# Altium footprint library Header2.PcbLib: 108 footprints (part 4 of 7)
Each footprint in its own frame and in the unit in brackets; x right, y up, seen from the top. Pads: shape width x height; smd on the part's side, far side on the other; paste and mask are expansions set on the pad; w line width, h text height; cw(c..) or ccw(c..) is an arc to the next point about the centre after c.
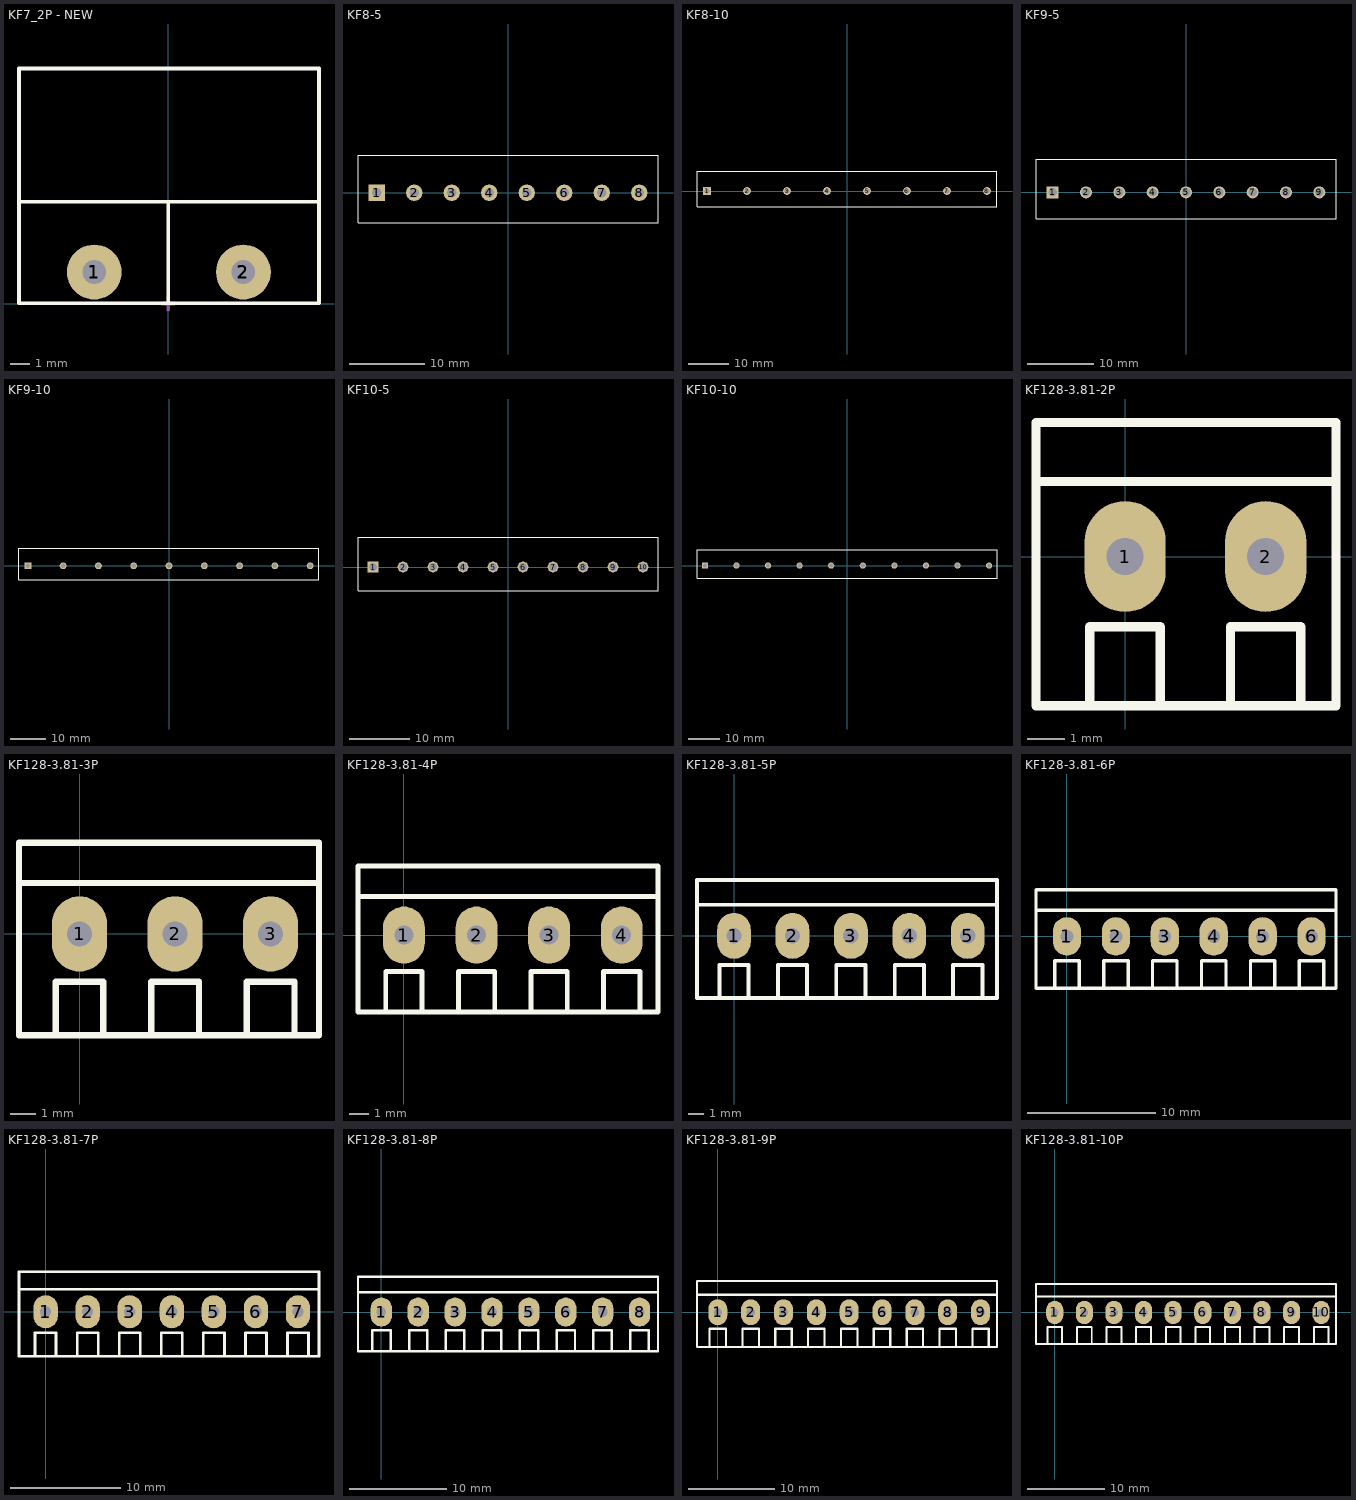
[diagram p3: the footprints below, top view; thin cyan lines are the x and y axes]

## KF7_2P - NEW [mm]
pads (8):
  round 2.794 hole 1.2: 1(-3.78,1.6) 1(-3.78,1.6) 1(-3.78,1.615) 1(-3.78,1.615) 2(3.84,1.6) 2(3.84,1.6) 2(3.84,1.615) 2(3.84,1.615)
Top Overlay:
  lines w0.2: -7.62,5.2 7.62,5.2 ; 0,0.015 0,5.19 ; -7.62,0.015 7.7,0.015 7.7,12 -7.62,12 -7.62,0.015
Mechanical 13:
  text "'.Designator'" at -1.7,0.6 h0.7
Mechanical 15:
  lines w0.2: -0.3,0 0.285,0 ; 0,-0.3 0,0.3
3D body "KF7_62-2P.STEP": height 12.41, standoff -6.29, extent -7.57,0 7.67,12

## KF8-5 [mm] "Serie 1337 - 5.00 mm_8 pins"
height 13
pads (8):
  rect 2.2x2.2 hole 1.3: 1(-17.5,0)
  round 2.2 hole 1.3: 2(-12.5,0) 3(-7.5,0) 4(-2.5,0) 5(2.5,0) 6(7.5,0) 7(12.5,0) 8(17.5,0)
Top Overlay:
  lines w0.127: -20,-4 20,-4 20,5 -20,5 -20,-4
3D body "691133710008.stp": height 13, standoff -3.6, extent -20,-4 20,5

## KF8-10 [mm] "Serie 1368 - 10.00 mm _ 8 pins"
height 13
pads (8):
  rect 1.95x1.95 hole 1.3: 1(-35,0)
  round 1.95 hole 1.3: 2(-25,0) 3(-15,0) 4(-5,0) 5(5,0) 6(15,0) 7(25,0) 8(35,0)
Top Overlay:
  lines w0.2: -37.5,-4 37.5,-4 37.5,5 -37.5,5 -37.5,-4
3D body "691136810008.stp": height 13.1, standoff -3.9, extent -37.5,-4 37.5,5

## KF9-5 [mm] "Serie 1337 - 5.00 mm_9 pins"
height 13
pads (9):
  rect 1.8x1.8 hole 1.3: 1(-20,0)
  round 1.8 hole 1.3: 2(-15,0) 3(-10,0) 4(-5,0) 5(0,0) 6(5,0) 7(10,0) 8(15,0) 9(20,0)
Top Overlay:
  lines w0.127: -22.5,-4 22.5,-4 22.5,5 -22.5,5 -22.5,-4
3D body "691133710009.stp": height 13, standoff -3.6, extent -22.5,-4 22.5,5

## KF9-10 [mm] "Serie 1368 - 10.00 mm _ 9 pins"
height 13
pads (9):
  rect 1.95x1.95 hole 1.3: 1(-40,0)
  round 1.95 hole 1.3: 2(-30,0) 3(-20,0) 4(-10,0) 5(0,0) 6(10,0) 7(20,0) 8(30,0) 9(40,0)
Top Overlay:
  lines w0.2: -42.5,-4 42.5,-4 42.5,5 -42.5,5 -42.5,-4
3D body "691136810009.stp": height 13.1, standoff -3.9, extent -42.5,-4 42.5,5

## KF10-5 [mm] "Serie 1337 - 5.00 mm_10 pins"
height 13
pads (10):
  rect 1.8x1.8 hole 1.3: 1(-22.5,0)
  round 1.8 hole 1.3: 2(-17.5,0) 3(-12.5,0) 4(-7.5,0) 5(-2.5,0) 6(2.5,0) 7(7.5,0) 8(12.5,0) 9(17.5,0) 10(22.5,0)
Top Overlay:
  lines w0.127: -25,-4 -25,5 25,5 25,-4 -25,-4
3D body "691133710010.stp": height 13, standoff -3.6, extent -25,-4 25,5

## KF10-10 [mm] "Serie 1368 - 10.00 mm _ 10 pins"
height 13
pads (10):
  rect 1.95x1.95 hole 1.3: 1(-45,0)
  round 1.95 hole 1.3: 2(-35,0) 3(-25,0) 4(-15,0) 5(-5,0) 6(5,0) 7(15,0) 8(25,0) 9(35,0) 10(45,0)
Top Overlay:
  lines w0.2: -47.5,-4 47.5,-4 47.5,5 -47.5,5 -47.5,-4
3D body "691136810010.stp": height 13.1, standoff -3.9, extent -47.5,-4 47.5,5

## KF128-3.81-2P [mm] "ÂÝ¶¤Ê½½ÓÏß¶Ë×Ó£¬½Å¾à3.81mm"
pads (2):
  oval 2.2x3 hole 1: 1(0,0) 2(3.81,0)
Top Overlay:
  lines w0.254: -2.413,2.032 5.715,2.032 ; -0.953,-4.039 -0.953,-1.905 0.953,-1.905 0.953,-4.039 ; 2.857,-4.039 2.857,-1.905 4.763,-1.905 4.763,-4.039 ; -2.413,-4.039 5.715,-4.039 5.715,3.632 -2.413,3.632 -2.413,-4.039
3D body "KF128-3.81.STEP": height 8.55, standoff -3.95, extent -2.413,-3.827 1.897,3.573
3D body "KF128-3.81.STEP": height 8.55, standoff -3.95, extent 1.397,-3.827 5.707,3.573

## KF128-3.81-3P [mm] "ÂÝ¶¤Ê½½ÓÏß¶Ë×Ó£¬½Å¾à3.81mm"
pads (3):
  oval 2.2x3 hole 1: 1(0,0) 2(3.81,0) 3(7.62,0)
Top Overlay:
  lines w0.254: -2.413,2.032 9.55,2.032 ; -0.953,-4.039 -0.953,-1.905 0.953,-1.905 0.953,-4.039 ; 2.857,-4.039 2.857,-1.905 4.763,-1.905 4.763,-4.039 ; 6.667,-4.039 6.667,-1.905 8.572,-1.905 8.572,-4.039 ; -2.413,-4.039 -2.413,3.632 9.55,3.632 9.55,-4.039 -2.413,-4.039
3D body "KF128-3.81.STEP": height 8.55, standoff -3.95, extent -2.413,-3.827 1.897,3.573
3D body "KF128-3.81.STEP": height 8.55, standoff -3.95, extent 1.397,-3.827 5.707,3.573
3D body "KF128-3.81.STEP": height 8.55, standoff -3.95, extent 5.207,-3.827 9.517,3.573

## KF128-3.81-4P [mm] "ÂÝ¶¤Ê½½ÓÏß¶Ë×Ó£¬½Å¾à3.81mm"
pads (4):
  oval 2.2x3 hole 1: 1(0,0) 2(3.81,0) 3(7.62,0) 4(11.43,0)
Top Overlay:
  lines w0.254: -2.413,2.032 13.335,2.032 ; -0.953,-4.039 -0.953,-1.905 0.953,-1.905 0.953,-4.039 ; 2.857,-4.039 2.857,-1.905 4.763,-1.905 4.763,-4.039 ; 6.667,-4.039 6.667,-1.905 8.572,-1.905 8.572,-4.039 ; 10.477,-4.039 10.477,-1.905 12.383,-1.905 12.383,-4.039 ; -2.413,-4.039 -2.413,3.632 13.335,3.632 13.335,-4.039 -2.413,-4.039
3D body "KF128-3.81.STEP": height 8.55, standoff -3.95, extent 9.017,-3.827 13.327,3.573
3D body "KF128-3.81.STEP": height 8.55, standoff -3.95, extent 5.207,-3.827 9.517,3.573
3D body "KF128-3.81.STEP": height 8.55, standoff -3.95, extent 1.397,-3.827 5.707,3.573
3D body "KF128-3.81.STEP": height 8.55, standoff -3.95, extent -2.413,-3.827 1.897,3.573

## KF128-3.81-5P [mm] "ÂÝ¶¤Ê½½ÓÏß¶Ë×Ó£¬½Å¾à3.81mm"
pads (5):
  oval 2.2x3 hole 1: 1(0,0) 2(3.81,0) 3(7.62,0) 4(11.43,0) 5(15.24,0)
Top Overlay:
  lines w0.254: -2.413,2.032 17.145,2.032 ; -0.953,-4.039 -0.953,-1.905 0.953,-1.905 0.953,-4.039 ; 2.857,-4.039 2.857,-1.905 4.763,-1.905 4.763,-4.039 ; 6.667,-4.039 6.667,-1.905 8.572,-1.905 8.572,-4.039 ; 10.477,-4.039 10.477,-1.905 12.383,-1.905 12.383,-4.039 ; 14.287,-4.039 14.287,-1.905 16.192,-1.905 16.192,-4.039 ; -2.413,-4.039 17.145,-4.039 17.145,3.632 -2.413,3.632 -2.413,-4.039
Mechanical 15:
  circle w0.05: c7.62,0 r0.35
  lines w0.05: 7.12,0 8.12,0 ; 7.62,-0.5 7.62,0.5
3D body "KF128-3.81.STEP": height 8.55, standoff -3.95, extent -2.413,-3.827 1.897,3.573
3D body "KF128-3.81.STEP": height 8.55, standoff -3.95, extent 1.397,-3.827 5.707,3.573
3D body "KF128-3.81.STEP": height 8.55, standoff -3.95, extent 5.207,-3.827 9.517,3.573
3D body "KF128-3.81.STEP": height 8.55, standoff -3.95, extent 12.827,-3.827 17.137,3.573
3D body "KF128-3.81.STEP": height 8.55, standoff -3.95, extent 9.017,-3.827 13.327,3.573

## KF128-3.81-6P [mm] "ÂÝ¶¤Ê½½ÓÏß¶Ë×Ó£¬½Å¾à3.81mm"
pads (6):
  oval 2.2x3 hole 1: 1(0,0) 2(3.81,0) 3(7.62,0) 4(11.43,0) 5(15.24,0) 6(19.05,0)
Top Overlay:
  lines w0.254: -2.413,2.032 20.955,2.032 ; -0.953,-4.039 -0.953,-1.905 0.953,-1.905 0.953,-4.039 ; 2.857,-4.039 2.857,-1.905 4.763,-1.905 4.763,-4.039 ; 6.667,-4.039 6.667,-1.905 8.572,-1.905 8.572,-4.039 ; 10.477,-4.039 10.477,-1.905 12.383,-1.905 12.383,-4.039 ; 14.287,-4.039 14.287,-1.905 16.192,-1.905 16.192,-4.039 ; 18.098,-4.039 18.098,-1.905 20.002,-1.905 20.002,-4.039 ; -2.413,-4.039 -2.413,3.632 20.955,3.632 20.955,-4.039 -2.413,-4.039
3D body "KF128-3.81.STEP": height 8.55, standoff -3.95, extent 9.017,-3.827 13.327,3.573
3D body "KF128-3.81.STEP": height 8.55, standoff -3.95, extent 12.827,-3.827 17.137,3.573
3D body "KF128-3.81.STEP": height 8.55, standoff -3.95, extent 16.637,-3.827 20.947,3.573
3D body "KF128-3.81.STEP": height 8.55, standoff -3.95, extent 5.207,-3.827 9.517,3.573
3D body "KF128-3.81.STEP": height 8.55, standoff -3.95, extent 1.397,-3.827 5.707,3.573
3D body "KF128-3.81.STEP": height 8.55, standoff -3.95, extent -2.413,-3.827 1.897,3.573

## KF128-3.81-7P [mm] "ÂÝ¶¤Ê½½ÓÏß¶Ë×Ó£¬½Å¾à3.81mm"
pads (7):
  oval 2.2x3 hole 1: 1(0,0) 2(3.81,0) 3(7.62,0) 4(11.43,0) 5(15.24,0) 6(19.05,0) 7(22.86,0)
Top Overlay:
  lines w0.254: -2.413,2.032 24.765,2.032 ; -0.953,-4.039 -0.953,-1.905 0.953,-1.905 0.953,-4.039 ; 2.857,-4.039 2.857,-1.905 4.763,-1.905 4.763,-4.039 ; 6.667,-4.039 6.667,-1.905 8.572,-1.905 8.572,-4.039 ; 10.477,-4.039 10.477,-1.905 12.383,-1.905 12.383,-4.039 ; 14.287,-4.039 14.287,-1.905 16.192,-1.905 16.192,-4.039 ; 18.098,-4.039 18.098,-1.905 20.002,-1.905 20.002,-4.039 ; 21.907,-4.039 21.907,-1.905 23.812,-1.905 23.812,-4.039 ; -2.413,-4.039 24.765,-4.039 24.765,3.632 -2.413,3.632 -2.413,-4.039
3D body "KF128-3.81.STEP": height 8.55, standoff -3.95, extent 20.447,-3.827 24.757,3.573
3D body "KF128-3.81.STEP": height 8.55, standoff -3.95, extent 9.017,-3.827 13.327,3.573
3D body "KF128-3.81.STEP": height 8.55, standoff -3.95, extent 12.827,-3.827 17.137,3.573
3D body "KF128-3.81.STEP": height 8.55, standoff -3.95, extent 16.637,-3.827 20.947,3.573
3D body "KF128-3.81.STEP": height 8.55, standoff -3.95, extent 5.207,-3.827 9.517,3.573
3D body "KF128-3.81.STEP": height 8.55, standoff -3.95, extent 1.397,-3.827 5.707,3.573
3D body "KF128-3.81.STEP": height 8.55, standoff -3.95, extent -2.413,-3.827 1.897,3.573

## KF128-3.81-8P [mm] "ÂÝ¶¤Ê½½ÓÏß¶Ë×Ó£¬½Å¾à3.81mm"
pads (8):
  oval 2.2x3 hole 1: 1(0,0) 2(3.81,0) 3(7.62,0) 4(11.43,0) 5(15.24,0) 6(19.05,0) 7(22.86,0) 8(26.67,0)
Top Overlay:
  lines w0.254: -2.413,2.032 28.575,2.032 ; -0.953,-4.039 -0.953,-1.905 0.953,-1.905 0.953,-4.039 ; 2.857,-4.039 2.857,-1.905 4.763,-1.905 4.763,-4.039 ; 6.667,-4.039 6.667,-1.905 8.572,-1.905 8.572,-4.039 ; 10.477,-4.039 10.477,-1.905 12.383,-1.905 12.383,-4.039 ; 14.287,-4.039 14.287,-1.905 16.192,-1.905 16.192,-4.039 ; 18.098,-4.039 18.098,-1.905 20.002,-1.905 20.002,-4.039 ; 21.907,-4.039 21.907,-1.905 23.812,-1.905 23.812,-4.039 ; 25.717,-4.039 25.717,-1.905 27.622,-1.905 27.622,-4.039 ; -2.413,-4.039 28.575,-4.039 28.575,3.632 -2.413,3.632 -2.413,-4.039
3D body "KF128-3.81.STEP": height 8.55, standoff -3.95, extent 20.447,-3.827 24.757,3.573
3D body "KF128-3.81.STEP": height 8.55, standoff -3.95, extent 24.257,-3.827 28.567,3.573
3D body "KF128-3.81.STEP": height 8.55, standoff -3.95, extent 9.017,-3.827 13.327,3.573
3D body "KF128-3.81.STEP": height 8.55, standoff -3.95, extent 12.827,-3.827 17.137,3.573
3D body "KF128-3.81.STEP": height 8.55, standoff -3.95, extent 16.637,-3.827 20.947,3.573
3D body "KF128-3.81.STEP": height 8.55, standoff -3.95, extent 5.207,-3.827 9.517,3.573
3D body "KF128-3.81.STEP": height 8.55, standoff -3.95, extent 1.397,-3.827 5.707,3.573
3D body "KF128-3.81.STEP": height 8.55, standoff -3.95, extent -2.413,-3.827 1.897,3.573

## KF128-3.81-9P [mm] "ÂÝ¶¤Ê½½ÓÏß¶Ë×Ó£¬½Å¾à3.81mm"
pads (9):
  oval 2.2x3 hole 1: 1(0,0) 2(3.81,0) 3(7.62,0) 4(11.43,0) 5(15.24,0) 6(19.05,0) 7(22.86,0) 8(26.67,0) 9(30.48,0)
Top Overlay:
  lines w0.254: -2.413,2.032 32.385,2.032 ; -0.953,-4.039 -0.953,-1.905 0.953,-1.905 0.953,-4.039 ; 2.857,-4.039 2.857,-1.905 4.763,-1.905 4.763,-4.039 ; 6.667,-4.039 6.667,-1.905 8.572,-1.905 8.572,-4.039 ; 10.477,-4.039 10.477,-1.905 12.383,-1.905 12.383,-4.039 ; 14.287,-4.039 14.287,-1.905 16.192,-1.905 16.192,-4.039 ; 18.098,-4.039 18.098,-1.905 20.002,-1.905 20.002,-4.039 ; 21.907,-4.039 21.907,-1.905 23.812,-1.905 23.812,-4.039 ; 25.717,-4.039 25.717,-1.905 27.622,-1.905 27.622,-4.039 ; 29.527,-4.039 29.527,-1.905 31.432,-1.905 31.432,-4.039 ; -2.413,-4.039 32.385,-4.039 32.385,3.632 -2.413,3.632 -2.413,-4.039
3D body "KF128-3.81.STEP": height 8.55, standoff -3.95, extent -2.413,-3.827 1.897,3.573
3D body "KF128-3.81.STEP": height 8.55, standoff -3.95, extent 1.397,-3.827 5.707,3.573
3D body "KF128-3.81.STEP": height 8.55, standoff -3.95, extent 5.207,-3.827 9.517,3.573
3D body "KF128-3.81.STEP": height 8.55, standoff -3.95, extent 16.637,-3.827 20.947,3.573
3D body "KF128-3.81.STEP": height 8.55, standoff -3.95, extent 12.827,-3.827 17.137,3.573
3D body "KF128-3.81.STEP": height 8.55, standoff -3.95, extent 9.017,-3.827 13.327,3.573
3D body "KF128-3.81.STEP": height 8.55, standoff -3.95, extent 28.067,-3.827 32.377,3.573
3D body "KF128-3.81.STEP": height 8.55, standoff -3.95, extent 24.257,-3.827 28.567,3.573
3D body "KF128-3.81.STEP": height 8.55, standoff -3.95, extent 20.447,-3.827 24.757,3.573

## KF128-3.81-10P [mm] "ÂÝ¶¤Ê½½ÓÏß¶Ë×Ó£¬½Å¾à3.81mm"
pads (10):
  oval 2.2x3 hole 1: 1(0,0) 2(3.81,0) 3(7.62,0) 4(11.43,0) 5(15.24,0) 6(19.05,0) 7(22.86,0) 8(26.67,0) 9(30.48,0) 10(34.29,0)
Top Overlay:
  lines w0.254: -2.413,2.032 36.195,2.032 ; -0.953,-4.039 -0.953,-1.905 0.953,-1.905 0.953,-4.039 ; 2.857,-4.039 2.857,-1.905 4.763,-1.905 4.763,-4.039 ; 6.667,-4.039 6.667,-1.905 8.572,-1.905 8.572,-4.039 ; 10.477,-4.039 10.477,-1.905 12.383,-1.905 12.383,-4.039 ; 14.287,-4.039 14.287,-1.905 16.192,-1.905 16.192,-4.039 ; 18.098,-4.039 18.098,-1.905 20.002,-1.905 20.002,-4.039 ; 21.907,-4.039 21.907,-1.905 23.812,-1.905 23.812,-4.039 ; 25.717,-4.039 25.717,-1.905 27.622,-1.905 27.622,-4.039 ; 29.527,-4.039 29.527,-1.905 31.432,-1.905 31.432,-4.039 ; 33.337,-4.039 33.337,-1.905 35.242,-1.905 35.242,-4.039 ; -2.413,-4.039 36.195,-4.039 36.195,3.632 -2.413,3.632 -2.413,-4.039
3D body "KF128-3.81.STEP": height 8.55, standoff -3.95, extent 31.877,-3.827 36.187,3.573
3D body "KF128-3.81.STEP": height 8.55, standoff -3.95, extent 20.447,-3.827 24.757,3.573
3D body "KF128-3.81.STEP": height 8.55, standoff -3.95, extent 24.257,-3.827 28.567,3.573
3D body "KF128-3.81.STEP": height 8.55, standoff -3.95, extent 28.067,-3.827 32.377,3.573
3D body "KF128-3.81.STEP": height 8.55, standoff -3.95, extent 9.017,-3.827 13.327,3.573
3D body "KF128-3.81.STEP": height 8.55, standoff -3.95, extent 12.827,-3.827 17.137,3.573
3D body "KF128-3.81.STEP": height 8.55, standoff -3.95, extent 16.637,-3.827 20.947,3.573
3D body "KF128-3.81.STEP": height 8.55, standoff -3.95, extent 5.207,-3.827 9.517,3.573
3D body "KF128-3.81.STEP": height 8.55, standoff -3.95, extent 1.397,-3.827 5.707,3.573
3D body "KF128-3.81.STEP": height 8.55, standoff -3.95, extent -2.413,-3.827 1.897,3.573